# Altium footprint library custom-case.PcbLib: 342 footprints (part 8 of 22)
Each footprint in its own frame and in the unit in brackets; x right, y up, seen from the top. Pads: shape width x height; smd on the part's side, far side on the other; paste and mask are expansions set on the pad; w line width, h text height; cw(c..) or ccw(c..) is an arc to the next point about the centre after c.
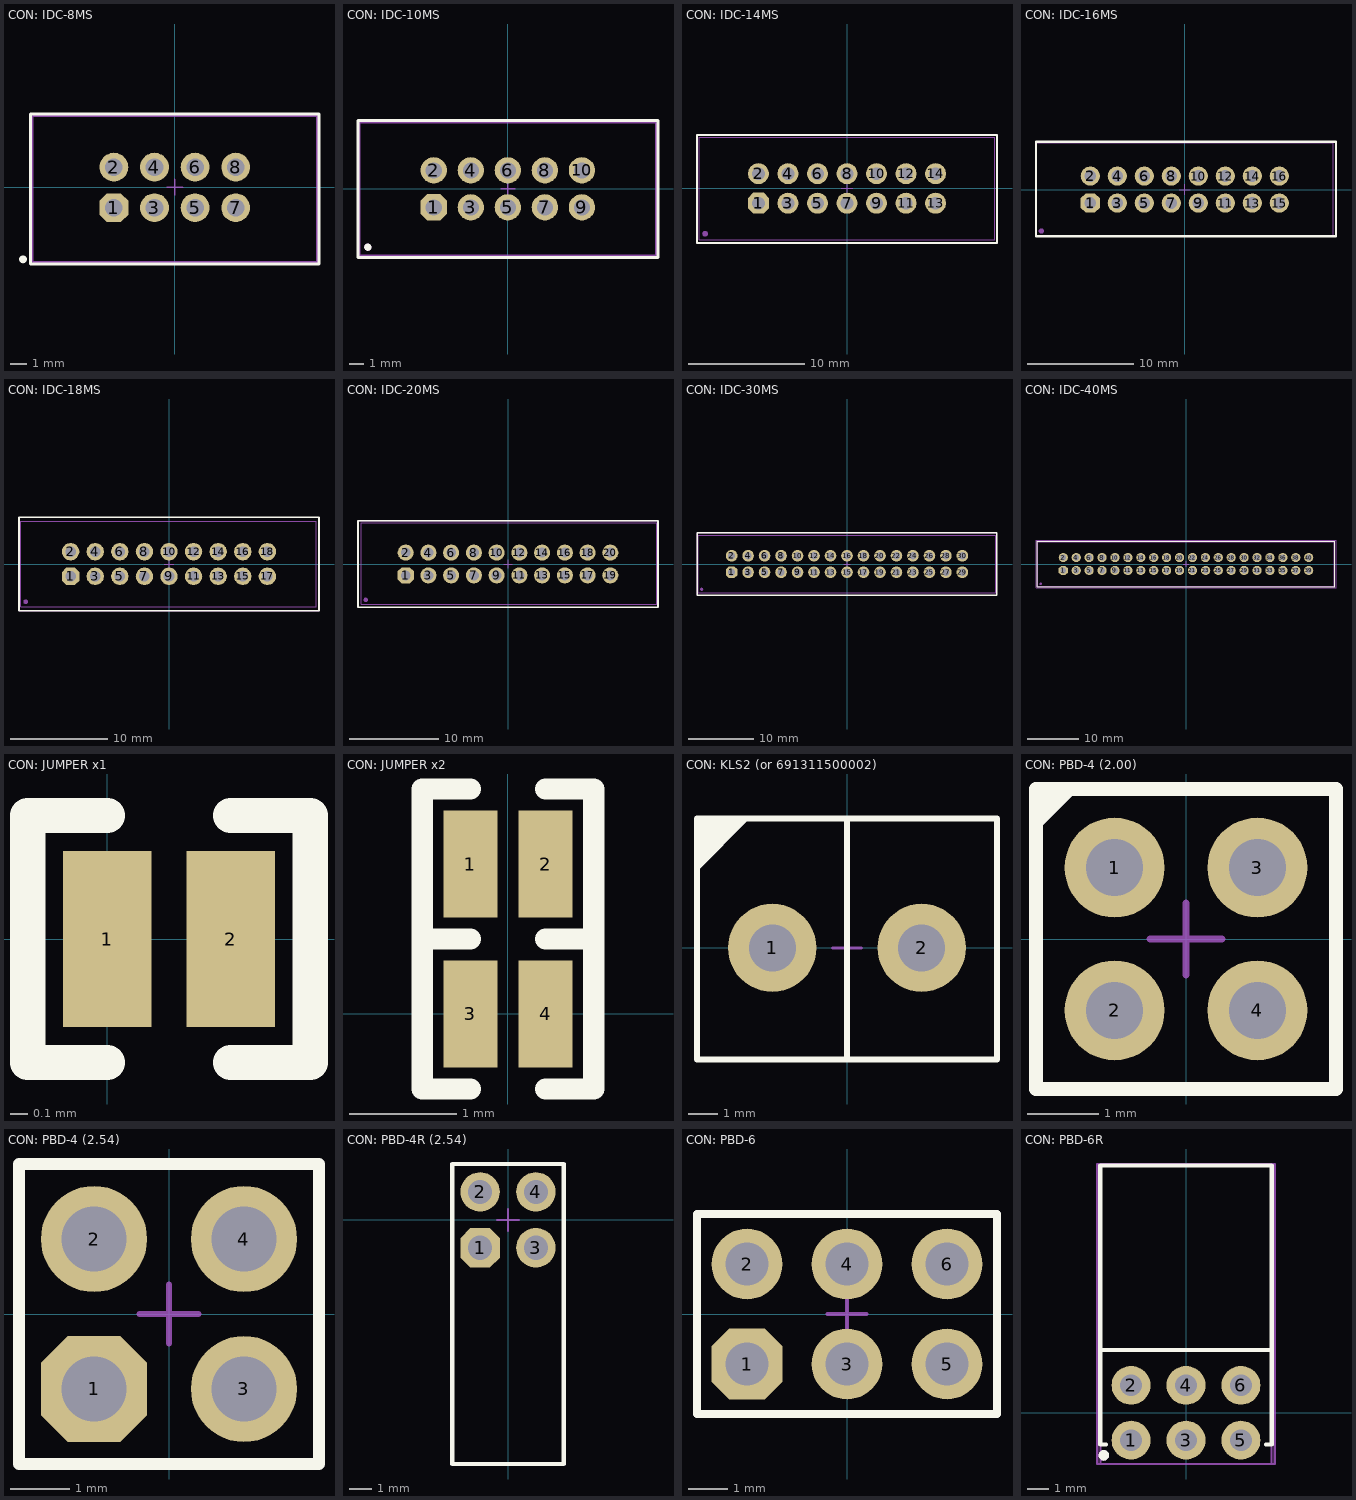
[diagram p7: the footprints below, top view; thin cyan lines are the x and y axes]

## CON: IDC-8MS [mm]
height 10
pads (9):
  oct 1.8x1.8 hole 1.1: 1(-3.81,-1.27)
  round 1.8 hole 1.1: 2(-3.81,1.27) 3(-1.27,-1.27) 4(-1.27,1.27) 5(1.27,-1.27) 6(1.27,1.27) 7(3.81,-1.27) 8(3.81,1.27)
  round 0.5 on Top Overlay: ""(-9.5,-4.5)
Top Overlay:
  lines w0.2: -9.025,-4.8 9.025,-4.8 9.025,4.6 -9.025,4.6 -9.025,-4.8
Top Assy:
  lines w0.1: -8.89,-4.65 8.89,-4.65 8.89,4.45 -8.89,4.45 -8.89,-4.65
Size Area:
  lines w0.1: -0.5,0 0.5,0 ; 0,-0.5 0,0.5 ; -8.975,-4.75 8.975,-4.75 8.975,4.55 -8.975,4.55 -8.975,-4.75
3D body "6666.STEP": height 8.9, standoff -3.2, extent -8.89,-4.65 8.89,4.45

## CON: IDC-10MS [mm] "IDC-10MS 10 pin PCB-mount header"
height 10
pads (12):
  oct 1.8x1.8 hole 1.1: 1(-5.08,-1.27)
  round 1.8 hole 1.1: 2(-5.08,1.27) 3(-2.54,-1.27) 4(-2.54,1.27) 5(0,-1.27) 6(0,1.27) 7(2.54,-1.27) 8(2.54,1.27) 9(5.08,-1.27) 10(5.08,1.27)
  round 0.5 on Mech1: ""(-9.6,-4)
  round 0.5 on Top Overlay: ""(-9.6,-4)
Top Overlay:
  lines w0.2: -10.275,-4.7 10.3,-4.7 10.3,4.675 -10.275,4.675 -10.275,-4.7
Top Assy:
  lines w0.1: -10.14,-4.572 -10.14,4.528 10.16,4.528 10.16,-4.572 -10.14,-4.572
Size Area:
  lines w0.1: -0.5,0 0.5,0 ; 0,-0.5 0,0.5 ; -10.225,-4.65 10.25,-4.65 10.25,4.625 -10.225,4.625 -10.225,-4.65
3D body "IDC-10MS.STEP": height 9, standoff -3.1, extent -10.14,-4.572 10.16,4.528

## CON: IDC-14MS [mm] "IDC-14MS connector"
height 9
pads (15):
  oct 1.8x1.8 hole 1.1: 1(-7.62,-1.27)
  round 1.8 hole 1.1: 2(-7.62,1.27) 3(-5.08,-1.27) 4(-5.08,1.27) 5(-2.54,-1.27) 6(-2.54,1.27) 7(0,-1.27) 8(0,1.27) 9(2.54,-1.27) 10(2.54,1.27) 11(5.08,-1.27) 12(5.08,1.27) 13(7.62,-1.27) 14(7.62,1.27)
  round 0.5 on Mech1: 38(-12.2,-3.9)
Top Overlay:
  lines w0.2: -12.9,-4.7 12.9,-4.7 12.9,4.6 -12.9,4.6 -12.9,-4.7
Top Assy:
  lines w0.1: -12.7,-4.4 -12.7,4.4 12.7,4.4 12.7,-4.4 -12.7,-4.4
Size Area:
  lines w0.1: -0.5,0 0.5,0 ; 0,-0.5 0,0.5 ; -12.9,-4.7 12.9,-4.7 12.9,4.6 -12.9,4.6 -12.9,-4.7
3D body "IDC-14MS.STEP": height 9.1, standoff -3, extent -12.715,-4.4 12.715,4.4

## CON: IDC-16MS [mm] "IDC-16MS straight leads pcb mount"
height 9
pads (17):
  oct 1.8x1.8 hole 1.1: 1(-8.89,-1.27)
  round 1.8 hole 1.1: 2(-8.89,1.27) 3(-6.35,-1.27) 4(-6.35,1.27) 5(-3.81,-1.27) 6(-3.81,1.27) 7(-1.27,-1.27) 8(-1.27,1.27) 9(1.27,-1.27) 10(1.27,1.27) 11(3.81,-1.27) 12(3.81,1.27) 13(6.35,-1.27) 14(6.35,1.27) 15(8.89,-1.27) 16(8.89,1.27)
  round 0.5 on Mech1: 39(-13.5,-3.9)
Top Overlay:
  lines w0.2: -14,-4.4 -14,4.5 14.224,4.5 14.224,-4.4 -14,-4.4
Top Assy:
  lines w0.1: -13.985,-4.4 13.985,-4.4 13.985,4.4 -13.985,4.4 -13.985,4.285 -13.985,-4.4
Size Area:
  lines w0.1: -0.5,0 0.5,0 ; 0,-0.5 0,0.5 ; -14,-4.4 -14,4.5 14.224,4.5 14.224,-4.4 -14,-4.4
3D body "IDC-16MS.STEP": height 9.1, standoff -3, extent -13.985,-4.4 13.985,4.4

## CON: IDC-18MS [mm]
height 10
pads (19):
  oct 1.8x1.8 hole 1.1: 1(-10.16,-1.27)
  round 1.8 hole 1.1: 2(-10.16,1.27) 3(-7.62,-1.27) 4(-7.62,1.27) 5(-5.08,-1.27) 6(-5.08,1.27) 7(-2.54,-1.27) 8(-2.54,1.27) 9(0,-1.27) 10(0,1.27) 11(2.54,-1.27) 12(2.54,1.27) 13(5.08,-1.27) 14(5.08,1.27) 15(7.62,-1.27) 16(7.62,1.27) 17(10.16,-1.27) 18(10.16,1.27)
  round 0.5 on Mech1: 40(-14.8,-3.9)
Top Overlay:
  lines w0.2: -15.494,-4.826 -15.494,4.826 15.494,4.826 15.494,-4.826 -15.494,-4.826
Top Assy:
  lines w0.1: -15.3,-4.4 15.2,-4.4 15.2,4.4 -15.3,4.4 -15.3,-4.4
Size Area:
  lines w0.1: -0.5,0 0.5,0 ; 0,-0.5 0,0.5 ; -15.494,-4.826 -15.494,4.826 15.494,4.826 15.494,-4.826 -15.494,-4.826
3D body "IDC-18MS.STEP": height 10.54, standoff -1, extent -15.28,-4.378 15.23,4.422

## CON: IDC-20MS [mm]
height 10
pads (21):
  oct 1.8x1.8 hole 1.1: 1(-11.43,-1.27)
  round 1.8 hole 1.1: 2(-11.43,1.27) 3(-8.89,-1.27) 4(-8.89,1.27) 5(-6.35,-1.27) 6(-6.35,1.27) 7(-3.81,-1.27) 8(-3.81,1.27) 9(-1.27,-1.27) 10(-1.27,1.27) 11(1.27,-1.27) 12(1.27,1.27) 13(3.81,-1.27) 14(3.81,1.27) 15(6.35,-1.27) 16(6.35,1.27) 17(8.89,-1.27) 18(8.89,1.27) 19(11.43,-1.27) 20(11.43,1.27)
  round 0.5 on Mech1: 41(-15.9,-4)
Top Overlay:
  lines w0.2: -16.764,-4.826 -16.764,4.826 16.764,4.826 16.764,-4.826 -16.764,-4.826
Top Assy:
  lines w0.1: -16.4,-4.5 16.6,-4.5 16.6,4.6 -16.4,4.6 -16.4,-4.5
Size Area:
  lines w0.1: -0.5,0 0.5,0 ; 0,-0.5 0,0.5 ; -16.764,-4.826 -16.764,4.826 16.764,4.826 16.764,-4.826 -16.764,-4.826
3D body "IDC-20MS.STEP": height 9, standoff -3, extent -16.43,-4.52 16.57,4.58

## CON: IDC-30MS [mm]
height 10
pads (31):
  oct 1.8x1.8 hole 1.1: 1(-17.78,-1.27)
  round 1.8 hole 1.1: 2(-17.78,1.27) 3(-15.24,-1.27) 4(-15.24,1.27) 5(-12.7,-1.27) 6(-12.7,1.27) 7(-10.16,-1.27) 8(-10.16,1.27) 9(-7.62,-1.27) 10(-7.62,1.27) 11(-5.08,-1.27) 12(-5.08,1.27) 13(-2.54,-1.27) 14(-2.54,1.27) 15(0,-1.27) 16(0,1.27) 17(2.54,-1.27) 18(2.54,1.27) 19(5.08,-1.27) 20(5.08,1.27) 21(7.62,-1.27) 22(7.62,1.27) 23(10.16,-1.27) 24(10.16,1.27) 25(12.7,-1.27) 26(12.7,1.27) 27(15.24,-1.27) 28(15.24,1.27) 29(17.78,-1.27) 30(17.78,1.27)
  round 0.5 on Mech1: 42(-22.4,-3.9)
Top Overlay:
  lines w0.2: -23.114,-4.826 -23.114,4.826 23.114,4.826 23.114,-4.826 -23.114,-4.826
Top Assy:
  lines w0.1: -22.9,-4.4 22.9,-4.4 22.9,4.4 -22.9,4.4 -22.9,-4.4
Size Area:
  lines w0.1: -0.5,0 0.5,0 ; 0,-0.5 0,0.5 ; -23.114,-4.826 -23.114,4.826 23.114,4.826 23.114,-4.826 -23.114,-4.826
3D body "IDC-30MS.STEP": height 8.78, standoff -3, extent -22.881,-4.392 22.869,4.408

## CON: IDC-40MS [mm]
height 10
pads (41):
  oct 1.8x1.8 hole 1.1: 1(-24.13,-1.27)
  round 1.8 hole 1.1: 2(-24.13,1.27) 3(-21.59,-1.27) 4(-21.59,1.27) 5(-19.05,-1.27) 6(-19.05,1.27) 7(-16.51,-1.27) 8(-16.51,1.27) 9(-13.97,-1.27) 10(-13.97,1.27) 11(-11.43,-1.27) 12(-11.43,1.27) 13(-8.89,-1.27) 14(-8.89,1.27) 15(-6.35,-1.27) 16(-6.35,1.27) 17(-3.81,-1.27) 18(-3.81,1.27) 19(-1.27,-1.27) 20(-1.27,1.27) 21(1.27,-1.27) 22(1.27,1.27) 23(3.87,-1.27) 24(3.81,1.27) 25(6.35,-1.27) 26(6.35,1.27) 27(8.89,-1.27) 28(8.89,1.27) 29(11.43,-1.27) 30(11.43,1.27) 31(13.97,-1.27) 32(13.97,1.27) 33(16.51,-1.27) 34(16.51,1.27) 35(19.05,-1.27) 36(19.05,1.27) 37(21.59,-1.27) 38(21.59,1.27) 39(24.13,-1.27) 40(24.13,1.27)
  round 0.5 on Mech1: 43(-28.6,-3.9)
Top Overlay:
  lines w0.2: -29.3,-4.5 29.3,-4.5 29.3,4.5 -29.3,4.5 -29.3,-4.5
Top Assy:
  lines w0.1: -29.2,-4.4 -29.2,4.4 29.2,4.4 29.2,-4.4 -29.2,-4.4
Size Area:
  lines w0.1: -0.5,0 0.5,0 ; 0,-0.5 0,0.5 ; -29.5,-4.7 29.5,-4.7 29.5,4.7 -29.5,4.7 -29.5,-4.7
3D body "IDC-40MS.STEP": height 8.78, standoff -3, extent -29.225,-4.4 29.225,4.4

## CON: JUMPER x1 [mm]
pads (2):
  rect 0.5x1 smd: 1(0,0) 2(0.7,0)
Top Overlay:
  lines w0.2: 0,-0.7 -0.45,-0.7 -0.45,0.7 0,0.7 ; 0.7,-0.7 1.15,-0.7 1.15,0.7 0.7,0.7

## CON: JUMPER x2 [mm]
pads (4):
  rect 0.5x1 smd: 1(-0.35,1.4) 2(0.35,1.4) 3(-0.35,0) 4(0.35,0)
Top Overlay:
  lines w0.2: -0.35,-0.7 -0.8,-0.7 -0.8,0.7 ; -0.35,2.1 -0.8,2.1 -0.8,0.7 ; 0.35,-0.7 0.8,-0.7 0.8,0.7 ; 0.35,2.1 0.8,2.1 0.8,0.7 ; -0.8,0.7 -0.35,0.7 -0.8,0.7 ; 0.8,0.7 0.35,0.7 0.8,0.7

## CON: KLS2 (or 691311500002) [mm]
pads (2):
  round 3 hole 1.6 mask+0.075: 1(-2.54,0) 2(2.54,0)
Top Overlay:
  region: -5.1,2.6 -3.3,4.4 -5.1,4.4
  region: -3.5,-3.8
  lines w0.2: 0,-3.8 0,4.4 ; -5.1,-3.8 5.1,-3.8 5.1,4.4 -5.1,4.4 -5.1,-3.8
Top Assy:
  lines w0.1: -5.1,-3.8 5.1,-3.8 5.1,4.4 -5.1,4.4 -5.1,-3.8
Size Area:
  lines w0.1: -0.5,0 0.5,0 ; 0,-0.5 0,0.5 ; -5.1,-3.8 5.1,-3.8 5.1,4.4 -5.1,4.4 -5.1,-3.8
3D body "691311500002 (rev1).stp": height 12.1, standoff -3.9, extent -5.1,-3.8 5.06,4.7

## CON: PBD-4 (2.00) [mm] "PBD-4"
height 10
pads (4):
  round 1.4 hole 0.8: 1(-1,1) 2(-1,-1) 3(1,1) 4(1,-1)
Top Overlay:
  region: -2.1,1.5
  region: -2.1,1.5 -1.5,2.1 -2.1,2.1
  lines w0.2: -2.1,-2.1 -2.1,2.1 2.1,2.1 2.1,-2.1 -2.1,-2.1
Top Assy:
  lines w0.1: -2.1,-2.1 -2.1,2.1 2.1,2.1 2.1,-2.1 -2.1,-2.1
Size Area:
  lines w0.1: -0.5,0 0.5,0 ; 0,-0.5 0,0.5 ; -2.1,-2.1 -2.1,2.1 2.1,2.1 2.1,-2.1 -2.1,-2.1
3D body "791077001-1.STEP": height 4.22, standoff -3.22, extent -2.095,-2.095 2.095,2.095

## CON: PBD-4 (2.54) [mm] "PBD-4"
height 10
pads (4):
  oct 1.8x1.8 hole 1.1: 1(-1.27,-1.27)
  round 1.8 hole 1.1: 2(-1.27,1.27) 3(1.27,-1.27) 4(1.27,1.27)
Top Overlay:
  lines w0.2: -2.54,-2.54 2.54,-2.54 2.54,2.54 -2.54,2.54 -2.54,-2.54
Top Assy:
  lines w0.1: -2.54,-2.54 2.54,-2.54 2.54,2.54 -2.54,2.54 -2.54,-2.54
Size Area:
  lines w0.1: -0.5,0 0.5,0 ; 0,-0.5 0,0.5 ; -2.54,-2.54 2.54,-2.54 2.54,2.54 -2.54,2.54 -2.54,-2.54
3D body "User Library-PBD-4R.STEP": height 8.53, standoff -0.57, extent -2.54,-2.54 2.54,2.54

## CON: PBD-4R (2.54) [mm] "PBD-4"
height 10
pads (4):
  oct 1.8x1.8 hole 1.1: 1(-1.27,-1.27)
  round 1.8 hole 1.1: 2(-1.27,1.27) 3(1.27,-1.27) 4(1.27,1.27)
Top Overlay:
  lines w0.2: -2.54,-11.1 -2.54,2.54 2.54,2.54 2.54,-11.1 -2.54,-11.1
Top Assy:
  lines w0.1: -2.54,-11.1 -2.54,2.54 2.54,2.54 2.54,-11.1 -2.54,-11.1
Size Area:
  lines w0.1: -0.5,0 0.5,0 ; 0,-0.5 0,0.5 ; -2.54,-11.1 -2.54,2.54 2.54,2.54 2.54,-11.1 -2.54,-11.1
3D body "User Library-PBD-4R.STEP": height 5.08, standoff -3.5, extent -2.54,-11.102 2.54,1.502

## CON: PBD-6 [mm] "PBD-6"
height 10
pads (6):
  oct 1.8x1.8 hole 1.1: 1(-2.54,-1.27)
  round 1.8 hole 1.1: 2(-2.54,1.27) 3(0,-1.27) 4(0,1.27) 5(2.54,-1.27) 6(2.54,1.27)
Top Overlay:
  lines w0.2: -3.81,-2.54 -3.81,2.54 3.81,2.54 3.81,-2.54 -3.81,-2.54
Top Assy:
  lines w0.1: -3.81,-2.54 -3.81,2.54 3.81,2.54 3.81,-2.54 -3.81,-2.54
Size Area:
  lines w0.1: -0.5,0 0.5,0 ; 0,-0.5 0,0.5 ; -3.81,-2.54 3.81,-2.54 3.81,2.54 -3.81,2.54 -3.81,-2.54
3D body "PBD-6.STEP": height 8.5, standoff -3, extent -3.81,-2.54 3.81,2.54

## CON: PBD-6R [mm]
pads (8):
  round 1.8 hole 1: 1(-2.54,-1.27) 2(-2.54,1.27) 3(0,-1.27) 4(0,1.27) 5(2.54,-1.27) 6(2.54,1.27)
  round 0.5 on Mech1: ""(-3.8,-1.97)
  round 0.5 on Top Overlay: ""(-3.8,-1.97)
Top Overlay:
  lines w0.2: -3.96,2.9 3.96,2.9 ; -3.7,-1.47 -3.96,-1.47 -3.96,11.43 3.96,11.43 3.96,-1.47 3.7,-1.47
Top Assy:
  lines w0.1: -3.96,-2.37 3.96,-2.37 3.96,11.43 -3.96,11.43 -3.96,-2.37
Size Area:
  lines w0.1: -4.1,-2.37 4.1,-2.37 4.1,11.5 -4.1,11.5 -4.1,-2.37
3D body "PLD-2x3.STEP": height 5.02, standoff -3.48, extent -3.96,-1.47 3.96,11.43